# Altium footprint library Stepper Base PcbLib.PcbLib: 3 footprints
Each footprint in its own frame and in the unit in brackets; x right, y up, seen from the top. Pads: shape width x height; smd on the part's side, far side on the other; paste and mask are expansions set on the pad; w line width, h text height; cw(c..) or ccw(c..) is an arc to the next point about the centre after c.
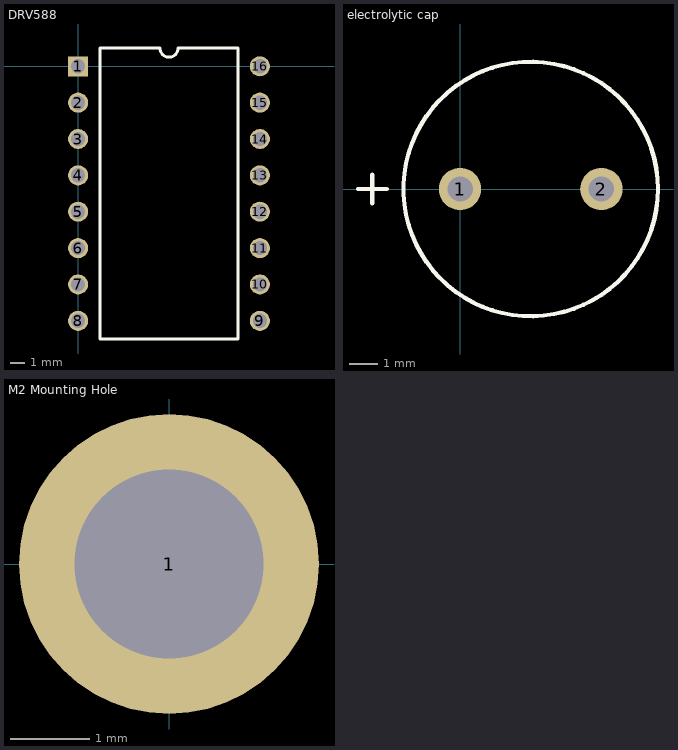
[diagram p0: the footprints below, top view; thin cyan lines are the x and y axes]

## DRV588 [mm]
pads (16):
  rect 1.4x1.4 hole 1: 1(0,0)
  round 1.4 hole 1: 2(0,-2.54) 3(0,-5.08) 4(0,-7.62) 5(0,-10.16) 6(0,-12.7) 7(0,-15.24) 8(0,-17.78) 9(12.7,-17.78) 10(12.7,-15.24) 11(12.7,-12.7) 12(12.7,-10.16) 13(12.7,-7.62) 14(12.7,-5.08) 15(12.7,-2.54) 16(12.7,0)
Top Overlay:
  lines w0.2: 1.535,-19.05 1.535,1.27 5.715,1.27 ccw(c6.35,1.27) 6.985,1.27 11.165,1.27 11.165,-19.05 1.535,-19.05

## electrolytic cap [mm]
pads (2):
  round 1.5 hole 0.9: 1(0,0) 2(5,0)
Top Overlay:
  circle w0.15: c2.5,0 r4.5
  lines w0.15: -3.608,0 -2.592,0 ; -3.1,-0.508 -3.1,0.508

## M2 Mounting Hole [mm]
pads (1):
  round 3.8 hole 2.4: 1(0,0)